# Altium schematic symbol library XPGDWT-B1-0000-00LE1.SchLib: 1 symbol
Pins are listed as number, name and electrical type; pins without a type are passive.

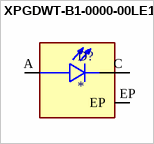
[diagram p0: symbol XPGDWT-B1-0000-00LE1]

## XPGDWT-B1-0000-00LE1
designator D?
LED Lighting XLampÂ® XP-G3 White, Cool 6500K 2.73V 350mA 125Â° 1414 (3535 Metric); MF: Cree; MP: XPGDWT-B1-0000-00LE1; SnapEDA_Link: https://www.snapeda.com/parts/XPGDWT-B1-0000-00LE1/Cree/view-part/?ref=snap; Package: 1414 Cree; Value: *; Check_prices: https://www.snapeda.com/parts/XPGDWT-B1-0000-00LE1/Cree/view-part/?ref=eda
footprint LED_XPGDWT-B1-0000-00LE1
pins: A, C, EP